# Altium schematic symbol library 16MHz晶振.SCHLIB: 1 symbol
Pins are listed as number, name and electrical type; pins without a type are passive.

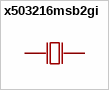
[diagram p0: symbol x503216msb2gi]

## x503216msb2gi
designator X??  (value not drawn)
晶振类型:贴片晶振;频率:16MHz;常温频差:±10ppm;负载电容:20pF;频率稳定度:±20ppm;; Manufacturer: YXC(扬兴晶振); AddInBom: yes; ModelId: 36c8b961b9064b60a7c920ab5154e867; ModelName: OSC-SMD_L5.0-W3.2-H1.4; ModelTransform: 196.85,126.023,0,0,0,0,0,0,0; Value: 16MHz; Normal temperature Frequency Tolerance: ±10ppm; Load Capacitance: 20pF; Frequency Stability: ±20ppm; Equivalent Series Resistance(ESR): 80Ω; Symbol: X503216MSB2GI; LCSC Part Name: YSX530GA 16MHZ 2P 5032 20PF ±10PPM -40~85℃ (±20PPM); SupplierPart: C112572; ManufacturerPart: X503216MSB2GI; Supplier Footprint: SMD5032-2P; JLCPCB Part Class: Extended Part; Datasheet: https://item.szlcsc.com/datasheet/X503216MSB2GI/113805.html; Supplier: LCSC; ConvertToPcb: yes; FootprintName: OSC-SMD_L5.0-W3.2; Type: 贴片晶振; Operating Temperature: -40℃~+85℃
footprint OSC-SMD_L5.0-W3.2
pins: 1 OSC1, 2 OSC2